# Altium footprint library Miscellaneous Connectors.PcbLib: 245 footprints (part 5 of 16)
Each footprint in its own frame and in the unit in brackets; x right, y up, seen from the top. Pads: shape width x height; smd on the part's side, far side on the other; paste and mask are expansions set on the pad; w line width, h text height; cw(c..) or ccw(c..) is an arc to the next point about the centre after c.
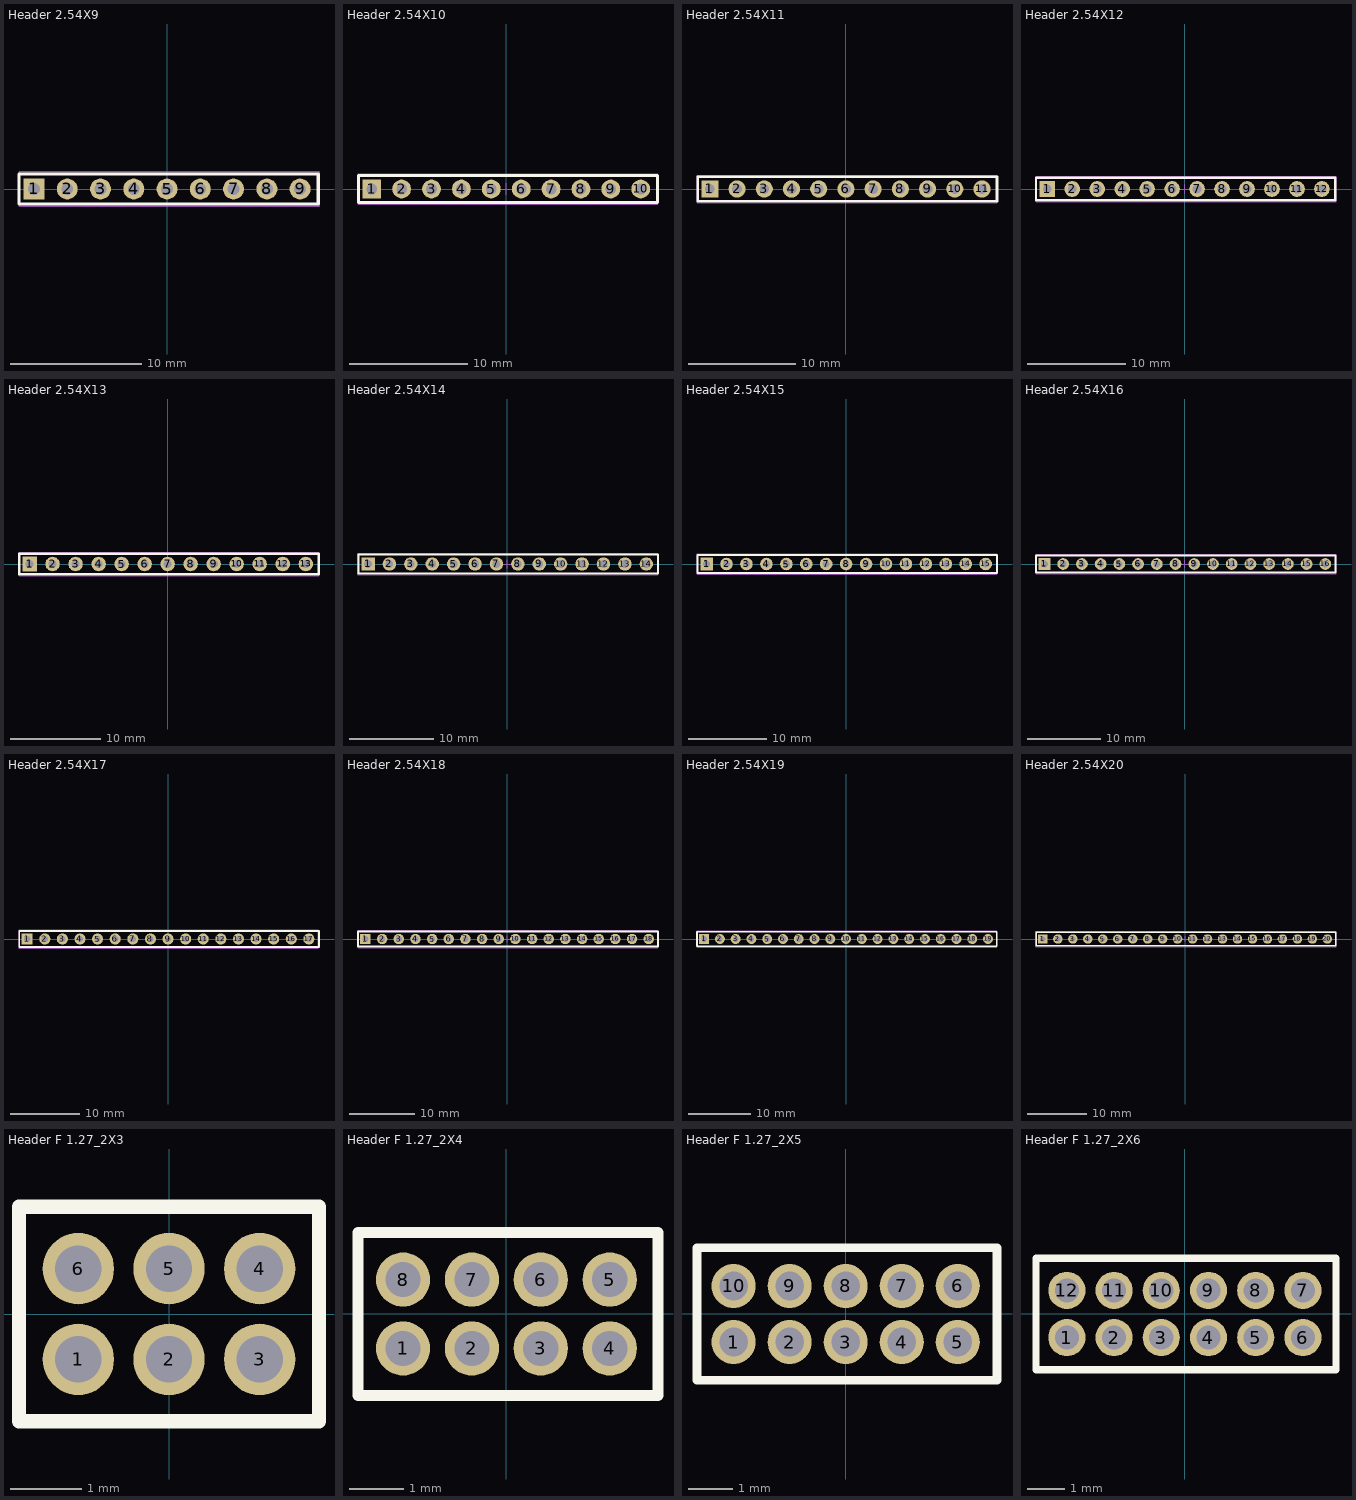
[diagram p4: the footprints below, top view; thin cyan lines are the x and y axes]

## Header 2.54X9 [mm]
pads (9):
  rect 1.6x1.6 hole 0.9: 1(-10.16,0)
  round 1.6 hole 0.9: 2(-7.62,0) 3(-5.08,0) 4(-2.54,0) 5(0,0) 6(2.54,0) 7(5.08,0) 8(7.62,0) 9(10.16,0)
Top Overlay:
  lines w0.254: -11.303,-1.143 -11.303,1.143 11.54,1.143 11.54,-1.143 -11.303,-1.143
Mechanical 15:
  lines w0.1: -11.3,-1.3 -11.3,1.3 11.6,1.3 11.6,-1.3 -11.3,-1.3
3D body: height 8.3, standoff -2.9, extent -11.303,-1.228 11.557,1.27

## Header 2.54X10 [mm]
pads (10):
  rect 1.6x1.6 hole 0.9: 1(-11.43,0)
  round 1.6 hole 0.9: 2(-8.89,0) 3(-6.35,0) 4(-3.81,0) 5(-1.27,0) 6(1.27,0) 7(3.81,0) 8(6.35,0) 9(8.89,0) 10(11.43,0)
Top Overlay:
  lines w0.254: -12.573,-1.143 12.87,-1.143 12.87,1.143 -12.573,1.143 -12.573,-1.143
Mechanical 15:
  lines w0.1: -0.5,0 0.5,0 ; 0,-0.5 0,0.5 ; -12.6,-1.3 12.9,-1.3 12.9,1.3 -12.6,1.3 -12.6,-1.3
3D body: height 8.3, standoff -2.9, extent -12.573,-1.228 12.827,1.27

## Header 2.54X11 [mm]
pads (11):
  rect 1.6x1.6 hole 0.9: 1(-12.7,0)
  round 1.6 hole 0.9: 2(-10.16,0) 3(-7.62,0) 4(-5.08,0) 5(-2.54,0) 6(0,0) 7(2.54,0) 8(5.08,0) 9(7.62,0) 10(10.16,0) 11(12.7,0)
Top Overlay:
  lines w0.254: -13.843,-1.143 14.1,-1.143 14.1,1.143 -13.843,1.143 -13.843,-1.143
Mechanical 15:
  lines w0.1: -13.9,-1.3 14.1,-1.3 14.1,1.3 -13.9,1.3 -13.9,-1.3
3D body: height 8.3, standoff -2.9, extent -13.843,-1.228 14.097,1.27

## Header 2.54X12 [mm]
pads (12):
  rect 1.6x1.6 hole 0.9: 1(-13.97,0)
  round 1.6 hole 0.9: 2(-11.43,0) 3(-8.89,0) 4(-6.35,0) 5(-3.81,0) 6(-1.27,0) 7(1.27,0) 8(3.81,0) 9(6.35,0) 10(8.89,0) 11(11.43,0) 12(13.97,0)
Top Overlay:
  lines w0.254: -15.113,-1.143 15.33,-1.143 15.33,1.143 -15.113,1.143 -15.113,-1.143
Mechanical 15:
  lines w0.1: -0.5,0 0.5,0 ; 0,-0.5 0,0.5 ; -15.1,-1.3 15.4,-1.3 15.4,1.3 -15.1,1.3 -15.1,-1.3
3D body: height 8.3, standoff -2.9, extent -15.113,-1.228 15.367,1.27

## Header 2.54X13 [mm]
pads (13):
  rect 1.6x1.6 hole 0.9: 1(-15.24,0)
  round 1.6 hole 0.9: 2(-12.7,0) 3(-10.16,0) 4(-7.62,0) 5(-5.08,0) 6(-2.54,0) 7(0,0) 8(2.54,0) 9(5.08,0) 10(7.62,0) 11(10.16,0) 12(12.7,0) 13(15.24,0)
Top Overlay:
  lines w0.254: -16.383,-1.143 16.66,-1.143 16.66,1.143 -16.383,1.143 -16.383,-1.143
Mechanical 15:
  lines w0.1: -16.4,-1.3 16.7,-1.3 16.7,1.3 -16.4,1.3 -16.4,-1.3
3D body: height 8.3, standoff -2.9, extent -16.383,-1.228 16.637,1.27

## Header 2.54X14 [mm]
pads (14):
  rect 1.6x1.6 hole 0.9: 1(-16.51,0)
  round 1.6 hole 0.9: 2(-13.97,0) 3(-11.43,0) 4(-8.89,0) 5(-6.35,0) 6(-3.81,0) 7(-1.27,0) 8(1.27,0) 9(3.81,0) 10(6.35,0) 11(8.89,0) 12(11.43,0) 13(13.97,0) 14(16.51,0)
Top Overlay:
  lines w0.254: -17.653,-1.143 -17.653,1.143 17.89,1.143 17.89,-1.143 -17.653,-1.143
Mechanical 15:
  lines w0.1: -0.5,0 0.5,0 ; 0,-0.5 0,0.5 ; -17.7,-1.3 -17.7,1.3 17.9,1.3 17.9,-1.3 -17.7,-1.3
3D body: height 8.3, standoff -2.9, extent -17.653,-1.228 17.907,1.27

## Header 2.54X15 [mm]
pads (15):
  rect 1.6x1.6 hole 0.9: 1(-17.78,0)
  round 1.6 hole 0.9: 2(-15.24,0) 3(-12.7,0) 4(-10.16,0) 5(-7.62,0) 6(-5.08,0) 7(-2.54,0) 8(0,0) 9(2.54,0) 10(5.08,0) 11(7.62,0) 12(10.16,0) 13(12.7,0) 14(15.24,0) 15(17.78,0)
Top Overlay:
  lines w0.254: -18.923,-1.143 19.22,-1.143 19.22,1.143 -18.923,1.143 -18.923,-1.143
Mechanical 15:
  lines w0.1: -19,-1.3 19.2,-1.3 19.2,1.3 -19,1.3 -19,-1.3
3D body: height 8.3, standoff -2.9, extent -18.923,-1.228 19.177,1.27

## Header 2.54X16 [mm]
pads (16):
  rect 1.6x1.6 hole 0.9: 1(-19.05,0)
  round 1.6 hole 0.9: 2(-16.51,0) 3(-13.97,0) 4(-11.43,0) 5(-8.89,0) 6(-6.35,0) 7(-3.81,0) 8(-1.27,0) 9(1.27,0) 10(3.81,0) 11(6.35,0) 12(8.89,0) 13(11.43,0) 14(13.97,0) 15(16.51,0) 16(19.05,0)
Top Overlay:
  lines w0.254: -20.193,-1.143 20.45,-1.143 20.45,1.143 -20.193,1.143 -20.193,-1.143
Mechanical 15:
  lines w0.1: -0.5,0 0.5,0 ; 0,-0.5 0,0.5 ; -20.2,-1.3 20.5,-1.3 20.5,1.3 -20.2,1.3 -20.2,-1.3
3D body: height 8.3, standoff -2.9, extent -20.193,-1.228 20.447,1.27

## Header 2.54X17 [mm]
pads (17):
  rect 1.6x1.6 hole 0.9: 1(-20.32,0)
  round 1.6 hole 0.9: 2(-17.78,0) 3(-15.24,0) 4(-12.7,0) 5(-10.16,0) 6(-7.62,0) 7(-5.08,0) 8(-2.54,0) 9(0,0) 10(2.54,0) 11(5.08,0) 12(7.62,0) 13(10.16,0) 14(12.7,0) 15(15.24,0) 16(17.78,0) 17(20.32,0)
Top Overlay:
  lines w0.254: -21.463,-1.143 -21.463,1.143 21.78,1.143 21.78,-1.143 -21.463,-1.143
Mechanical 15:
  lines w0.1: -21.5,-1.3 -21.5,1.3 21.7,1.3 21.7,-1.3 -21.5,-1.3
3D body: height 8.3, standoff -2.9, extent -21.463,-1.228 21.717,1.27

## Header 2.54X18 [mm]
pads (18):
  rect 1.6x1.6 hole 0.9: 1(-21.59,0)
  round 1.6 hole 0.9: 2(-19.05,0) 3(-16.51,0) 4(-13.97,0) 5(-11.43,0) 6(-8.89,0) 7(-6.35,0) 8(-3.81,0) 9(-1.27,0) 10(1.27,0) 11(3.81,0) 12(6.35,0) 13(8.89,0) 14(11.43,0) 15(13.97,0) 16(16.51,0) 17(19.05,0) 18(21.59,0)
Top Overlay:
  lines w0.254: -22.733,-1.143 -22.733,1.143 23.01,1.143 23.01,-1.143 -22.733,-1.143
Mechanical 15:
  lines w0.1: -0.5,0 0.5,0 ; 0,-0.5 0,0.5 ; -22.7,-1.3 -22.7,1.3 23,1.3 23,-1.3 -22.7,-1.3
3D body: height 8.3, standoff -2.9, extent -22.733,-1.228 22.987,1.27

## Header 2.54X19 [mm]
pads (19):
  rect 1.6x1.6 hole 0.9: 1(-22.86,0)
  round 1.6 hole 0.9: 2(-20.32,0) 3(-17.78,0) 4(-15.24,0) 5(-12.7,0) 6(-10.16,0) 7(-7.62,0) 8(-5.08,0) 9(-2.54,0) 10(0,0) 11(2.54,0) 12(5.08,0) 13(7.62,0) 14(10.16,0) 15(12.7,0) 16(15.24,0) 17(17.78,0) 18(20.32,0) 19(22.86,0)
Top Overlay:
  lines w0.254: -24.003,-1.143 24.24,-1.143 24.24,1.143 -24.003,1.143 -24.003,-1.143
Mechanical 15:
  lines w0.1: -24,-1.3 24.3,-1.3 24.3,1.3 -24,1.3 -24,-1.3
3D body: height 8.3, standoff -2.9, extent -24.003,-1.228 24.257,1.27

## Header 2.54X20 [mm]
pads (20):
  rect 1.6x1.6 hole 0.9: 1(-24.13,0)
  round 1.6 hole 0.9: 2(-21.59,0) 3(-19.05,0) 4(-16.51,0) 5(-13.97,0) 6(-11.43,0) 7(-8.89,0) 8(-6.35,0) 9(-3.81,0) 10(-1.27,0) 11(1.27,0) 12(3.81,0) 13(6.35,0) 14(8.89,0) 15(11.43,0) 16(13.97,0) 17(16.51,0) 18(19.05,0) 19(21.59,0) 20(24.13,0)
Top Overlay:
  lines w0.254: -25.273,-1.143 25.57,-1.143 25.57,1.143 -25.273,1.143 -25.273,-1.143
Mechanical 15:
  lines w0.1: -0.5,0 0.5,0 ; 0,-0.5 0,0.5 ; -25.3,-1.3 25.6,-1.3 25.6,1.3 -25.3,1.3 -25.3,-1.3
3D body: height 8.3, standoff -2.9, extent -25.273,-1.228 25.527,1.27

## Header F 1.27_2X3 [mm]
pads (6):
  round 1 hole 0.65: 1(-1.27,-0.635) 2(0,-0.635) 3(1.27,-0.635) 4(1.27,0.635) 5(0,0.635) 6(-1.27,0.635)
Top Overlay:
  lines w0.2: -2.1,-1.5 -2.1,1.5 2.1,1.5 2.1,-1.5 -2.1,-1.5
Mechanical 15:
  lines w0.1: -2.1,-1.5 2.1,-1.5 2.1,1.5 -2.1,1.5 -2.1,-1.5
3D body: height 3.4, standoff -2.4, extent -2.105,-1.5 2.105,1.6

## Header F 1.27_2X4 [mm]
pads (8):
  round 1 hole 0.65: 1(-1.905,-0.635) 2(-0.635,-0.635) 3(0.635,-0.635) 4(1.905,-0.635) 5(1.905,0.635) 6(0.635,0.635) 7(-0.635,0.635) 8(-1.905,0.635)
Top Overlay:
  lines w0.2: -2.735,-1.5 -2.735,1.5 2.795,1.5 2.795,-1.5 -2.735,-1.5
Mechanical 15:
  lines w0.1: -2.735,-1.5 2.795,-1.5 2.795,1.5 -2.735,1.5 -2.735,-1.5
3D body: height 3.4, standoff -2.4, extent -2.74,-1.5 2.74,1.6

## Header F 1.27_2X5 [mm]
pads (10):
  round 1 hole 0.65: 1(-2.54,-0.635) 2(-1.27,-0.635) 3(0,-0.635) 4(1.27,-0.635) 5(2.54,-0.635) 6(2.54,0.635) 7(1.27,0.635) 8(0,0.635) 9(-1.27,0.635) 10(-2.54,0.635)
Top Overlay:
  lines w0.2: -3.37,-1.5 3.43,-1.5 3.43,1.5 -3.37,1.5 -3.37,-1.5
Mechanical 15:
  lines w0.1: -3.37,-1.5 -3.37,1.5 3.43,1.5 3.43,-1.5 -3.37,-1.5
3D body: height 3.4, standoff -2.4, extent -3.375,-1.5 3.375,1.6

## Header F 1.27_2X6 [mm]
pads (12):
  round 1 hole 0.65: 1(-3.175,-0.635) 2(-1.905,-0.635) 3(-0.635,-0.635) 4(0.635,-0.635) 5(1.905,-0.635) 6(3.175,-0.635) 7(3.175,0.635) 8(1.905,0.635) 9(0.635,0.635) 10(-0.635,0.635) 11(-1.905,0.635) 12(-3.175,0.635)
Top Overlay:
  lines w0.2: -4.005,-1.5 -4.005,1.5 4.065,1.5 4.065,-1.5 -4.005,-1.5
Mechanical 15:
  lines w0.1: -4.005,-1.5 4.065,-1.5 4.065,1.5 -4.005,1.5 -4.005,-1.5
3D body: height 3.4, standoff -2.4, extent -4.01,-1.5 4.01,1.6